# Altium footprint library FootPrintLib_8.PcbLib: 590 footprints (part 7 of 37)
Each footprint in its own frame and in the unit in brackets; x right, y up, seen from the top. Pads: shape width x height; smd on the part's side, far side on the other; paste and mask are expansions set on the pad; w line width, h text height; cw(c..) or ccw(c..) is an arc to the next point about the centre after c.
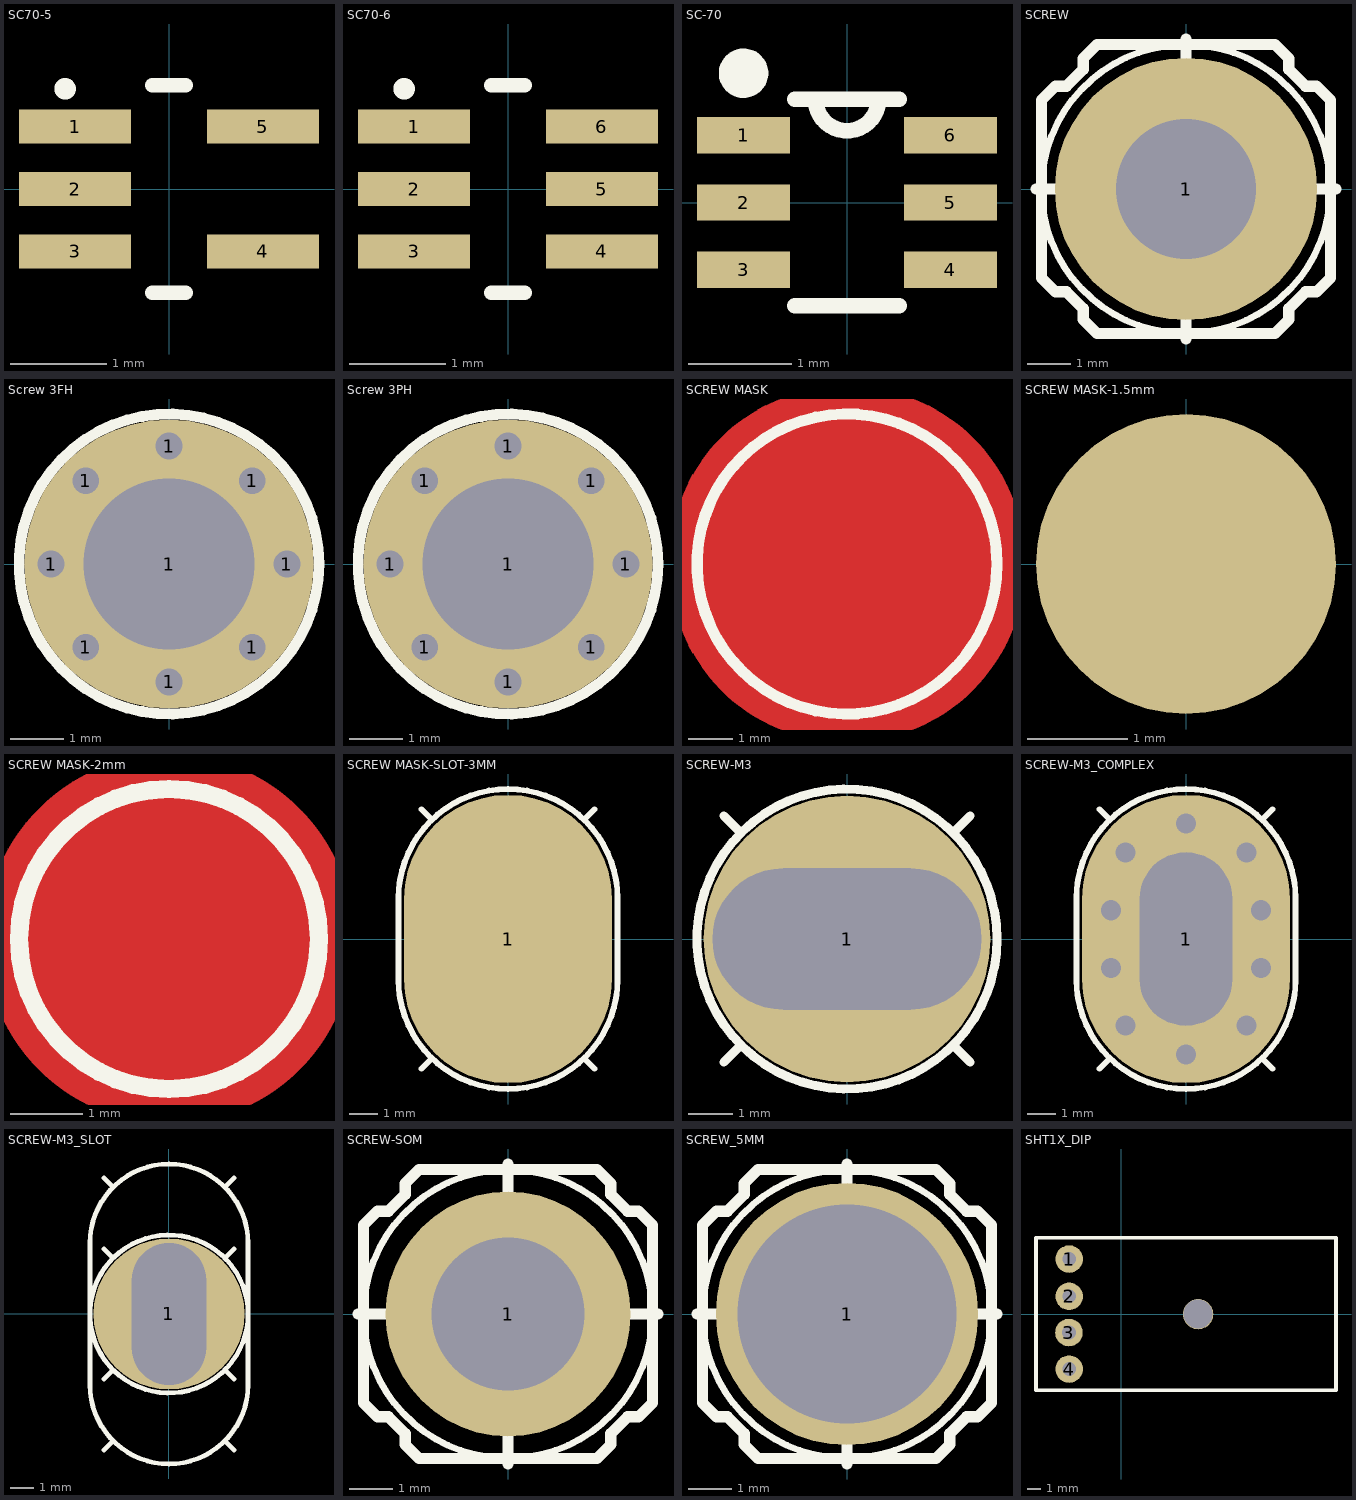
[diagram p6: the footprints below, top view; thin cyan lines are the x and y axes]

## SC70-5 [mil] "SC70/SOT-323 (DCK) Package. 5-Lead Plastic SC70."
height 39.37
pads (5):
  rect 46x14 smd: 1(-38.5,25.59) 2(-38.5,0) 3(-38.5,-25.59) 4(38.5,-25.59) 5(38.5,25.59)
Top Overlay:
  circle w6: c-42.59,41.09 r1.41
  lines w6: -6.93,-42.5 6.93,-42.5 ; -6.93,42.5 6.93,42.5
3D body "User Library-SC70-5.step": height 37.4, standoff 0, extent -41.34,-39.37 41.34,39.37

## SC70-6 [mil] "SC70/SOT-323 (DCK) Package. 6-Lead Plastic SC70."
height 39.37
pads (6):
  rect 46x14 smd: 1(-38.5,25.59) 2(-38.5,0) 3(-38.5,-25.59) 4(38.5,-25.59) 5(38.5,0) 6(38.5,25.59)
Top Overlay:
  circle w6: c-42.59,41.09 r1.41
  lines w6: -6.93,-42.5 6.93,-42.5 ; -6.93,42.5 6.93,42.5
3D body "User Library-SC70-6.step": height 36.42, standoff -0.98, extent -41.33,-39.37 41.34,39.37

## SC-70 [mm]
pads (6):
  rect 0.9x0.35 smd: 1(-1,0.65) 2(-1,0) 3(-1,-0.65) 4(1,-0.65) 5(1,0) 6(1,0.65)
Top Overlay:
  circle w0.254: c-1,1.25 r0.112
  lines w0.152: -0.506,-0.999 0.506,-0.999 ; -0.506,0.999 0.506,0.999 ; -0.305,0.999 ccw(c0,0.999) 0.305,0.999

## SCREW [mm]
height 1.35
pads (1):
  round 6 hole 3.2: 1(0,0)
Top Overlay:
  circle w0.152: c0,0 r3.302
  lines w0.254: -3.429,0 0,0 ; 0,-3.429 0,0 ; 0,3.429 0,0 ; 3.429,0 0,0 ; -3.302,-2.032 -2.984,-2.349 -2.73,-2.349 -2.349,-2.73 -2.349,-2.984 -2.032,-3.302 0,-3.302 2.032,-3.302 2.349,-2.984 2.349,-2.73 2.73,-2.349 2.984,-2.349 3.302,-2.032 3.302,0 3.302,2.032 2.984,2.349 2.73,2.349 2.349,2.73 2.349,2.984 2.032,3.302 0,3.302 -2.032,3.302 -2.349,2.984 -2.349,2.73 -2.73,2.349 -2.984,2.349 -3.302,2.032 -3.302,0 -3.302,-2.032
3D body "m3x6.STEP": height 2.32, standoff -5.08, extent -3.473,-3.506 3.527,3.494

## Screw 3FH [mm] "Flat Head Screw"
height 2
pads (9):
  round 0.6 hole 0.5: 1(-2.2,0) 1(-1.556,-1.556) 1(-1.556,1.556) 1(0,-2.2) 1(0,2.2) 1(1.556,-1.556) 1(1.556,1.556) 1(2.2,0)
  round 5.4 hole 3.2: 1(0,0)
Top Overlay:
  circle w0.2: c0,0 r2.8
3D body "09654P__3__5-mattssons.step": height 1.6, standoff -3.4, extent -2.797,-2.8 2.797,2.8

## Screw 3PH [mm] "Pan Head Screw"
height 2
pads (9):
  round 0.6 hole 0.5: 1(-2.2,0) 1(-1.556,-1.556) 1(-1.556,1.556) 1(0,-2.2) 1(0,2.2) 1(1.556,-1.556) 1(1.556,1.556) 1(2.2,0)
  round 5.4 hole 3.2: 1(0,0)
Top Overlay:
  circle w0.2: c0,0 r2.8
3D body "User Library-M3x0_5xL Phillips Panhead Screw4mm.STEP": height 2.38, standoff -4, extent -2.8,-2.8 2.8,2.8

## SCREW MASK [mm]
Top Layer:
  circle w5.08: c0,-0.001 r1.481
Top Overlay:
  circle w0.254: c0.001,-0.003 r3.378

## SCREW MASK-1.5mm [mm]
pads (1):
  round 3 smd mask+0.1: ""(0,0)
Top Overlay:
  circle w0.2: c0,0 r1.2

## SCREW MASK-2mm [mm]
Top Layer:
  circle w5.08: c0,-0.001 r0.015
Top Overlay:
  circle w0.254: c0.001,-0.003 r2.075

## SCREW MASK-SLOT-3MM [mm]
pads (1):
  oval 7.2x10 smd: 1(0,0)
Top Overlay:
  lines w0.2: -3.8,-1.4 -3.8,1.4 ; 3.8,-1.4 3.8,1.4
  lines w0.203: -3.8,-1.4 ccw(c0,-1.4) 3.8,-1.4 ; -3.8,1.4 cw(c0,1.4) 3.8,1.4 ; -3,-4.5 -2.675,-4.175 ; -3,4.5 -2.675,4.175 ; 2.675,-4.175 3,-4.5 ; 2.675,4.175 3,4.5

## SCREW-M3 [mm]
height 1.2
pads (1):
  round 6.5 hole 3.2 slot 6.096 at 0 deg: 1(0,0)
Top Overlay:
  circle w0.203: c0,0 r3.4
  lines w0.203: -2.794,-2.794 -2.413,-2.413 ; -2.794,2.794 -2.413,2.413 ; 2.413,-2.413 2.794,-2.794 ; 2.413,2.413 2.794,2.794
3D body "m3x6.STEP": height 2.32, standoff -5.08, extent -3.486,-3.502 3.514,3.498

## SCREW-M3_COMPLEX [mm]
height 1.2
pads (1):
  oval 7.2x10 hole 3.2 slot 6 at 90 deg: 1(0,0)
via -2.6,-1 diameter 1.4 hole 0.7
via -2.6,1 diameter 1.4 hole 0.7
via 2.6,-1 diameter 1.4 hole 0.7
via 2.6,1 diameter 1.4 hole 0.7
via 2.1,-3 diameter 1.4 hole 0.7
via -2.1,-3 diameter 1.4 hole 0.7
via -2.1,3 diameter 1.4 hole 0.7
via 2.1,3 diameter 1.4 hole 0.7
via 0,-4 diameter 1.4 hole 0.7
via 0,4 diameter 1.4 hole 0.7
Top Overlay:
  lines w0.2: -3.8,-1.4 -3.8,1.4 ; 3.8,-1.4 3.8,1.4
  lines w0.203: -3.8,-1.4 ccw(c0,-1.4) 3.8,-1.4 ; -3.8,1.4 cw(c0,1.4) 3.8,1.4 ; -3,-4.5 -2.675,-4.175 ; -3,4.5 -2.675,4.175 ; 2.675,-4.175 3,-4.5 ; 2.675,4.175 3,4.5

## SCREW-M3_SLOT [mm]
height 1.2
pads (1):
  round 6.5 hole 3.2 slot 6.096 at 90 deg: 1(0,0)
Top Overlay:
  circle w0.203: c0,0 r3.4
  lines w0.2: -3.4,-3.05 -3.4,0.1 ; -3.4,-0.1 -3.4,3.05 ; 3.4,-3.05 3.4,0.1 ; 3.4,-0.1 3.4,3.05
  lines w0.203: -3.4,-3.05 ccw(c0,-3.05) 3.4,-3.05 ; -3.4,3.05 cw(c0,3.05) 3.4,3.05 ; -2.794,-5.844 -2.413,-5.463 ; -2.794,-2.794 -2.413,-2.413 ; -2.794,2.794 -2.413,2.413 ; -2.794,5.844 -2.413,5.463 ; 2.413,-5.463 2.794,-5.844 ; 2.413,-2.413 2.794,-2.794 ; 2.413,2.413 2.794,2.794 ; 2.413,5.463 2.794,5.844

## SCREW-SOM [mm]
height 1.35
pads (1):
  round 5.6 hole 3.505: 1(0,0)
Top Overlay:
  circle w0.152: c0,0 r3.302
  lines w0.254: -3.429,0 0,0 ; 0,-3.429 0,0 ; 0,3.429 0,0 ; 3.429,0 0,0 ; -3.302,-2.032 -2.984,-2.349 -2.73,-2.349 -2.349,-2.73 -2.349,-2.984 -2.032,-3.302 0,-3.302 2.032,-3.302 2.349,-2.984 2.349,-2.73 2.73,-2.349 2.984,-2.349 3.302,-2.032 3.302,0 3.302,2.032 2.984,2.349 2.73,2.349 2.349,2.73 2.349,2.984 2.032,3.302 0,3.302 -2.032,3.302 -2.349,2.984 -2.349,2.73 -2.73,2.349 -2.984,2.349 -3.302,2.032 -3.302,0 -3.302,-2.032
3D body "m3x6.STEP": height 2.32, standoff -5.08, extent -3.473,-3.506 3.527,3.494

## SCREW_5MM [mm]
height 1.35
pads (1):
  round 6 hole 5: 1(0,0)
Top Overlay:
  circle w0.152: c0,0 r3.302
  lines w0.254: -3.429,0 0,0 ; 0,-3.429 0,0 ; 0,3.429 0,0 ; 3.429,0 0,0 ; -3.302,-2.032 -2.984,-2.349 -2.73,-2.349 -2.349,-2.73 -2.349,-2.984 -2.032,-3.302 0,-3.302 2.032,-3.302 2.349,-2.984 2.349,-2.73 2.73,-2.349 2.984,-2.349 3.302,-2.032 3.302,0 3.302,2.032 2.984,2.349 2.73,2.349 2.349,2.73 2.349,2.984 2.032,3.302 0,3.302 -2.032,3.302 -2.349,2.984 -2.349,2.73 -2.73,2.349 -2.984,2.349 -3.302,2.032 -3.302,0 -3.302,-2.032

## SHT1X_DIP [mm]
pads (5):
  round 2 hole 1: 1(-3.79,3.99) 2(-3.79,1.29) 3(-3.81,-1.34) 4(-3.79,-3.99)
  round 2.2 hole 2.1: ""(5.56,-0.01)
Top Overlay:
  lines w0.254: -6.2,-5.53 -6.2,5.54 15.56,5.54 15.56,-5.53 -6.2,-5.53
3D body "SHT_11_PCB.SLDPRT": height 1.51, standoff 0, extent -5.79,-5.01 15.11,4.99
3D body "SHT_11_SMD.SLDPRT": height 4.4, standoff 1.9, extent 7.05,-2.58 14.55,2.42